# Altium footprint library PcbLib1.PcbLib: 24 footprints (part 1 of 2)
Each footprint in its own frame and in the unit in brackets; x right, y up, seen from the top. Pads: shape width x height; smd on the part's side, far side on the other; paste and mask are expansions set on the pad; w line width, h text height; cw(c..) or ccw(c..) is an arc to the next point about the centre after c.
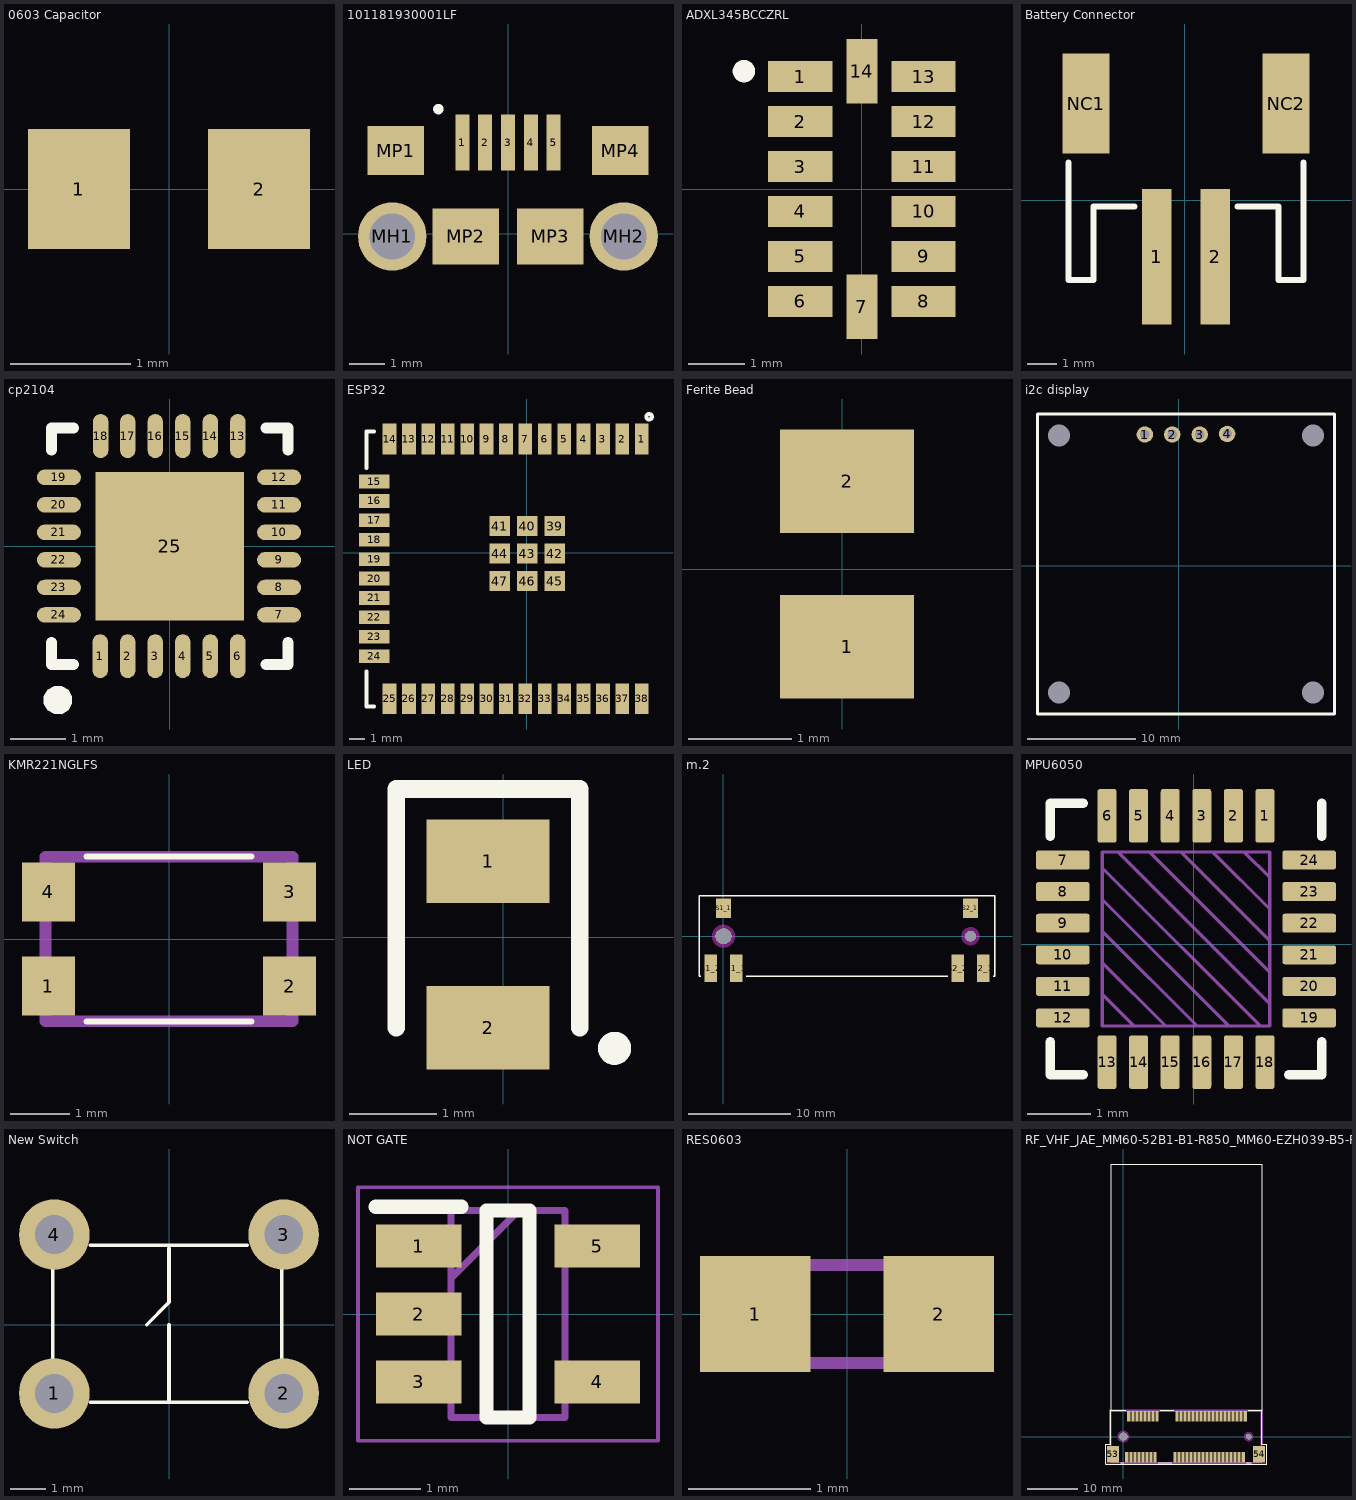
[diagram p0: the footprints below, top view; thin cyan lines are the x and y axes]

## 0603 Capacitor [mm]
pads (2):
  rect 0.85x1 smd: 1(-0.75,0) 2(0.75,0)
3D body "Ceramic_Capacitor_0603_h32mil.step": height 0.81, standoff 0.01, extent -0.8,-0.4 0.8,0.4

## 101181930001LF [mm]
pads (11):
  rect 0.4x1.6 smd: 1(-1.3,2.6) 2(-0.65,2.6) 3(0,2.6) 4(0.65,2.6) 5(1.3,2.6)
  round 1.95 hole 1.3: MH1(-3.3,-0.075) MH2(3.3,-0.075)
  rect 1.6x1.4 smd: MP1(-3.2,2.375) MP4(3.2,2.375)
  rect 1.9x1.6 smd: MP2(-1.2,-0.075) MP3(1.2,-0.075)
Top Overlay:
  lines w0.2: -2.035,3.557 ccw(c-1.985,3.557) -1.935,3.557 ; -2.035,3.557 cw(c-1.985,3.557) -1.935,3.557 ; -2.035,3.557 ccw(c-1.985,3.557) -1.935,3.557
3D body "User Library-10118193.step": height 2.85, standoff -0.75, extent -3.928,-2.761 3.928,2.9

## ADXL345BCCZRL [mm]
pads (14):
  rect 1.145x0.55 smd: 1(-1.097,2) 2(-1.097,1.2) 3(-1.097,0.4) 4(-1.097,-0.4) 5(-1.097,-1.2) 6(-1.097,-2) 8(1.097,-2) 9(1.097,-1.2) 10(1.097,-0.4) 11(1.097,0.4) 12(1.097,1.2) 13(1.097,2)
  rect 0.55x1.145 smd: 7(0,-2.098) 14(0,2.098)
Top Overlay:
  lines w0.2: -2.2,2.097 cw(c-2.101,2.097) -2.001,2.097 cw(c-2.101,2.097) -2.2,2.097
3D body "ADXL345BCCZ-RL.stp": height 1.1, standoff 0, extent -1.5,-2.5 1.5,2.5

## Battery Connector [mm]
pads (4):
  rect 1x4.6 smd: 1(-0.965,-1.922) 2(1.035,-1.922)
  rect 1.6x3.4 smd: NC1(-3.365,3.278) NC2(3.435,3.278)
Top Overlay:
  lines w0.203: -3.965,1.278 -3.965,-2.722 -3.115,-2.722 -3.115,-0.222 -1.715,-0.222 ; 1.785,-0.222 3.185,-0.222 3.185,-2.722 4.035,-2.722 4.035,1.278

## cp2104 [mm]
pads (25):
  oval 0.28x0.8 smd: 1(-1.263,-1.999) 2(-0.763,-1.999) 3(-0.263,-1.999) 4(0.237,-1.999) 5(0.737,-1.999) 6(1.237,-1.999) 13(1.237,2.001) 14(0.737,2.001) 15(0.237,2.001) 16(-0.263,2.001) 17(-0.763,2.001) 18(-1.255,2.001)
  oval 0.8x0.28 smd: 7(1.987,-1.248) 8(1.987,-0.749) 9(1.987,-0.248) 10(1.987,0.251) 11(1.987,0.752) 12(1.987,1.251) 19(-2.013,1.251) 20(-2.013,0.752) 21(-2.013,0.251) 22(-2.013,-0.248) 23(-2.013,-0.749) 24(-2.013,-1.248)
  rect 2.7x2.7 smd: 25(0,0.001)
Top Overlay:
  region: -1.777,-2.793 -1.778,-2.725 -1.846,-2.607 -1.964,-2.54 -2.1,-2.54 -2.218,-2.608 -2.285,-2.726 -2.285,-2.862 -2.218,-2.98 -2.1,-3.048 -1.964,-3.048 -1.846,-2.981 -1.778,-2.863 -1.777,-2.795
  lines w0.2: -2.151,-1.749 -2.151,-2.149 -1.751,-2.149 ; -2.151,1.751 -2.151,2.151 -1.751,2.151 ; 1.75,-2.149 2.15,-2.149 2.15,-1.749 ; 1.75,2.151 2.15,2.151 2.15,1.751

## ESP32 [mm]
pads (47):
  rect 0.9x2 smd: 1(7.513,7.433) 2(6.243,7.433) 3(4.973,7.433) 4(3.703,7.433) 5(2.433,7.433) 6(1.163,7.433) 7(-0.107,7.433) 8(-1.377,7.433) 9(-2.647,7.433) 10(-3.917,7.433) 11(-5.187,7.433) 12(-6.457,7.433) 13(-7.727,7.433) 14(-8.997,7.433) 25(-8.997,-9.567) 26(-7.727,-9.567) 27(-6.457,-9.567) 28(-5.187,-9.567) 29(-3.917,-9.567) 30(-2.647,-9.567) 31(-1.377,-9.567) 32(-0.107,-9.567) 33(1.163,-9.567) 34(2.433,-9.567) 35(3.703,-9.567) 36(4.973,-9.567) 37(6.243,-9.567) 38(7.513,-9.567)
  rect 2x0.9 smd: 15(-9.997,4.648) 16(-9.997,3.378) 17(-9.997,2.108) 18(-9.997,0.838) 19(-9.997,-0.432) 20(-9.997,-1.702) 21(-9.997,-2.972) 22(-9.997,-4.242) 23(-9.997,-5.512) 24(-9.997,-6.782)
  rect 1.33x1.33 smd: 39(1.813,1.733) 40(0.013,1.733) 41(-1.787,1.733) 42(1.813,-0.067) 43(0.013,-0.067) 44(-1.787,-0.067) 45(1.813,-1.867) 46(0.013,-1.867) 47(-1.787,-1.867)
Top Overlay:
  circle w0.254: c8.001,8.89 r0.18
  lines w0.254: -10.497,-7.767 -10.497,-10.067 -9.997,-10.067 ; -10.497,5.533 -10.497,7.933 -9.997,7.933
3D body "User Library-ESP321.step": height -0.41, standoff -3.32, extent -10.461,-10.121 15.039,7.879

## Ferite Bead [mm] "Ferite Bead 30 Ohm @100MHz 0805 20m Ohm"
pads (2):
  rect 1.3x1 smd: 1(0.048,-0.747) 2(0.048,0.853)

## i2c display [mil]
pads (8):
  round 60 hole 35: 1(-124.21,479.01) 2(-24.21,479.01) 3(75.79,479.01) 4(175.79,481.14)
  round 60 / inner round 100 / far side round 60 hole 80 unplated: ""(-436.81,-461.93) ""(-436.81,475.07) ""(488.39,-461.93) ""(488.39,475.07)
Top Overlay:
  lines w10: -515.55,-540.67 567.13,-540.67 567.13,553.81 -515.55,553.81 -515.55,-540.67
3D body "I2COLEDDisplayAdafruit.step": height 207.98, standoff -219.02, extent -500.59,-526.85 550.59,570

## KMR221NGLFS [mm]
pads (4):
  rect 0.9x1 smd: 1(-2.05,-0.8) 2(2.05,-0.8) 3(2.05,0.8) 4(-2.05,0.8)
Top Overlay:
  lines w0.1: -1.4,-1.4 1.4,-1.4 ; -1.4,1.4 1.4,1.4
Mechanical 13:
  lines w0.2: -2.1,-1.4 2.1,-1.4 2.1,1.4 -2.1,1.4 -2.1,-1.4
3D body "User Library-Switch-CK-KMR2.STEP": height 2.1, standoff 0, extent -2.35,-1.478 2.25,1.522

## LED [mm]
pads (2):
  rect 1.4x0.95 smd: 1(-0.175,0.866) 2(-0.175,-1.034)
Top Overlay:
  circle w0.254: c1.27,-1.27 r0.062
  lines w0.2: -1.225,-1.034 -1.225,1.691 0.875,1.691 0.875,-1.034
3D body "User Library-KP-2012.STEP": height 1.1, standoff 0, extent -0.825,-1.001 0.425,1.001

## m.2 [mm]
pads (8):
  rect 1.5x1.9 smd: S1_1(0.009,2.751) S2_1(24.209,2.751)
  rect 1.2x2.7 smd: S1_2(-1.241,-3.149) S1_3(1.259,-3.149) S2_2(22.959,-3.149) S2_3(25.459,-3.149)
  round 1.55 hole 1.55 unplated mask+0.102: ""(0.009,0.001)
  round 1.05 hole 1.05 unplated: ""(24.209,0.001)
Top Overlay:
  lines w0.127: -2.241,-3.949 -2.391,-3.949 -2.391,3.951 26.609,3.951 26.609,-3.949 26.459,-3.949 ; 2.259,-3.949 21.959,-3.949
Keep-Out Layer:
  circle w0.381: c0,0 r0.94
  circle w0.381: c24.206,0 r0.711
Mechanical 6:
  lines w0.127: 26.609,-3.949 26.609,3.951 26.609,-3.949
3D body "K3D-MM60-EZH039-B5-R2 JAE Connector Division Proprietary.STEP": height 4.7, standoff -0.9, extent -2.391,-3.924 26.609,3.976

## MPU6050 [mm] "Accelerometer"
pads (24):
  rrect25% 0.3x0.85 smd mask+0: 1(1.128,2.031) 2(0.628,2.031) 3(0.128,2.031) 4(-0.372,2.031) 5(-0.872,2.031) 6(-1.372,2.031) 13(-1.372,-1.869) 14(-0.872,-1.869) 15(-0.372,-1.869) 16(0.128,-1.869) 17(0.628,-1.869) 18(1.128,-1.869)
  rrect25% 0.85x0.3 smd mask+0: 7(-2.072,1.331) 8(-2.072,0.831) 9(-2.072,0.331) 10(-2.072,-0.169) 11(-2.072,-0.669) 12(-2.072,-1.169) 19(1.828,-1.169) 20(1.828,-0.669) 21(1.828,-0.169) 22(1.828,0.331) 23(1.828,0.831) 24(1.828,1.331)
Top Overlay:
  lines w0.15: -2.272,-1.544 -2.272,-2.069 -1.747,-2.069 ; -2.272,1.706 -2.272,2.231 -1.747,2.231 ; 1.503,-2.069 2.028,-2.069 2.028,-1.544 ; 2.028,1.706 2.028,2.231
Mechanical 2:
  lines w0.05: -1.447,-0.794 -0.947,-1.294 ; -1.447,-0.294 -0.447,-1.294 ; -1.447,0.206 0.053,-1.294 ; -1.447,0.706 0.553,-1.294 ; -1.447,1.206 1.053,-1.294 ; -1.197,1.456 1.203,-0.944 ; -0.697,1.456 1.203,-0.444 ; -0.197,1.456 1.203,0.056 ; 0.303,1.456 1.203,0.556 ; 0.803,1.456 1.203,1.056 ; -1.447,-1.294 1.203,-1.294 1.203,1.456 -1.447,1.456 -1.447,-1.294

## New Switch [mm]
pads (4):
  round 2 hole 1.1: 1(-3.25,-1.95) 2(3.25,-1.95) 3(3.25,2.55) 4(-3.25,2.55)
Top Overlay:
  lines w0.1: -3.3,-1.179 -3.3,1.7 ; -2.235,-2.195 2.21,-2.195 ; -2.235,2.25 2.21,2.25 ; -0.635,0 0,0.635 0,2.159 ; 0,-2.195 0,0 ; 3.2,-1.179 3.2,1.8
3D body "Tactal Switch -Thru 6x 6x10.stp": height 10, standoff -3.18, extent -4.286,-2.997 4.086,2.997

## NOT GATE [mm]
pads (5):
  rect 1.2x0.6 smd: 1(-1.25,0.95) 2(-1.25,0) 3(-1.25,-0.95) 4(1.25,-0.95) 5(1.25,0.95)
Top Overlay:
  lines w0.2: -1.85,1.5 -0.65,1.5 ; -0.3,-1.45 -0.3,1.45 0.3,1.45 0.3,-1.45 -0.3,-1.45
Mechanical 13:
  lines w0.1: -0.8,0.5 0.15,1.45 ; -0.8,-1.45 -0.8,1.45 0.8,1.45 0.8,-1.45 -0.8,-1.45
Mechanical 15:
  lines w0.05: -2.1,-1.775 -2.1,1.775 2.1,1.775 2.1,-1.775 -2.1,-1.775
3D body "SN74LVC1G04DBVR.stp": height 1.45, standoff 0, extent -1.4,-1.45 1.4,1.45

## RES0603 [mm]
pads (2):
  rect 0.9x0.95 smd: 1(-0.75,0) 2(0.75,0)
Mechanical 13:
  lines w0.1: -0.775,-0.4 0.775,-0.4 0.775,0.4 -0.775,0.4 -0.775,-0.4
3D body "CPF0603B330RE1.stp": height 0.55, standoff 0, extent -0.775,-0.4 0.775,0.4

## RF_VHF_JAE_MM60-52B1-B1-R850_MM60-EZH039-B5-R850_w_2005_mPCIe_card [mil]
height 45.67
pads (56):
  rect 25x83 smd: 1(27.56,-161.41) 2(43.31,161.42) 3(59.05,-161.41) 4(74.8,161.42) 5(90.55,-161.41) 6(106.3,161.42) 7(122.05,-161.41) 8(137.79,161.42) 9(153.54,-161.41) 10(169.29,161.42) 11(185.04,-161.41) 12(200.79,161.42) 13(216.53,-161.41) 14(232.28,161.42) 15(248.03,-161.41) 16(263.78,161.42) 17(405.51,-161.41) 18(421.26,161.42) 19(437.01,-161.41) 20(452.76,161.42) 21(468.5,-161.41) 22(484.25,161.42) 23(500,-161.41) 24(515.75,161.42) 25(531.5,-161.41) 26(547.24,161.42) 27(562.99,-161.41) 28(578.74,161.42) 29(594.49,-161.41) 30(610.24,161.42) 31(625.98,-161.41) 32(641.73,161.42) 33(657.48,-161.41) 34(673.23,161.42) 35(688.98,-161.41) 36(704.72,161.42) 37(720.47,-161.41) 38(736.22,161.42) 39(751.97,-161.41) 40(767.72,161.42) 41(783.46,-161.41) 42(799.21,161.42) 43(814.96,-161.41) 44(830.71,161.42) 45(846.46,-161.41) 46(862.2,161.42) 47(877.95,-161.41) 48(893.7,161.42) 49(909.45,-161.41) 50(925.2,161.42) 51(940.94,-161.41) 52(956.69,161.42)
  rect 96x132 smd: 53(-81.69,-137.79) 54(1065.94,-137.79)
  round 64.02 hole 64 unplated: ""(0,0)
  round 44.02 hole 44 unplated: ""(984.25,0)
Top Overlay:
  lines w5: -100,204 -100,2140 ; -100,2140.6 1087,2140.6 1087,205 ; 17.53,205.79 -100,205.79 -100,-60 -138,-60 -138,-215 1126,-215 1126,-60 1087,-60 1087,205.79 982.48,205.79
  lines w6: -20.82,-206.21 1.88,-206.21 ; 273.71,-206.21 379.83,-206.21 ; 289.56,205.79 395.48,205.79 ; 966.62,-206.21 1005.07,-206.21
Top Solder:
  region: 984.25,32.28 975.9,31.18 968.11,27.95 961.43,22.83 956.3,16.14 953.08,8.36 951.98,0 953.08,-8.35 956.3,-16.14 961.43,-22.82 968.11,-27.95 975.9,-31.17 984.25,-32.27 992.61,-31.17 1000.39,-27.95 1007.07,-22.82 1012.2,-16.14 1015.43,-8.35 1016.53,0 1015.43,8.36 1012.2,16.14 1007.07,22.83 1000.39,27.95 992.61,31.18
  region: 0,42.36 -10.96,40.92 -21.18,36.69 -29.95,29.95 -36.69,21.18 -40.92,10.96 -42.36,0 -40.92,-10.96 -36.69,-21.18 -29.95,-29.96 -21.18,-36.69 -10.96,-40.92 0,-42.36 10.96,-40.92 21.18,-36.69 29.95,-29.96 36.69,-21.18 40.92,-10.96 42.36,0 40.92,10.96 36.69,21.18 29.95,29.95 21.18,36.69 10.96,40.92
Keep-Out Layer:
  circle w15: c984.25,0 r30
  circle w15: c0,0 r40
Mechanical 6:
  lines w5: -98.37,-203.21 1082.63,-203.21 1082.63,198.79 -98.37,198.79 -98.37,-203.21
  lines w6: -137.09,-213.16 -21.09,-213.16 -21.09,-210.58 1010.54,-210.58 1010.54,-213.16 1126.54,-213.16 1126.54,-61.16 1095.22,-61.16 1095.22,211.42 -106,211.42 -106,-61.16 -137.09,-61.16 -137.09,-213.16 ; -95.78,-200.58 -95.78,201.42 1085.22,201.42 1085.22,-200.58 -95.78,-200.58
3D body "K3D-MM60-52B1-B1-R2 JAE Connector Division Proprietary.STEP": height 149.61, standoff -35.43, extent -92.92,-198.43 1076.37,195.27
3D body "TILE-LB_102120211208.step": height 271.74, standoff 69.61, extent -97.79,-3.35 1083.31,2002.56